# Altium footprint library Package_DFN_QFN.PcbLib: 735 footprints (part 13 of 46)
Each footprint in its own frame and in the unit in brackets; x right, y up, seen from the top. Pads: shape width x height; smd on the part's side, far side on the other; paste and mask are expansions set on the pad; w line width, h text height; cw(c..) or ccw(c..) is an arc to the next point about the centre after c.
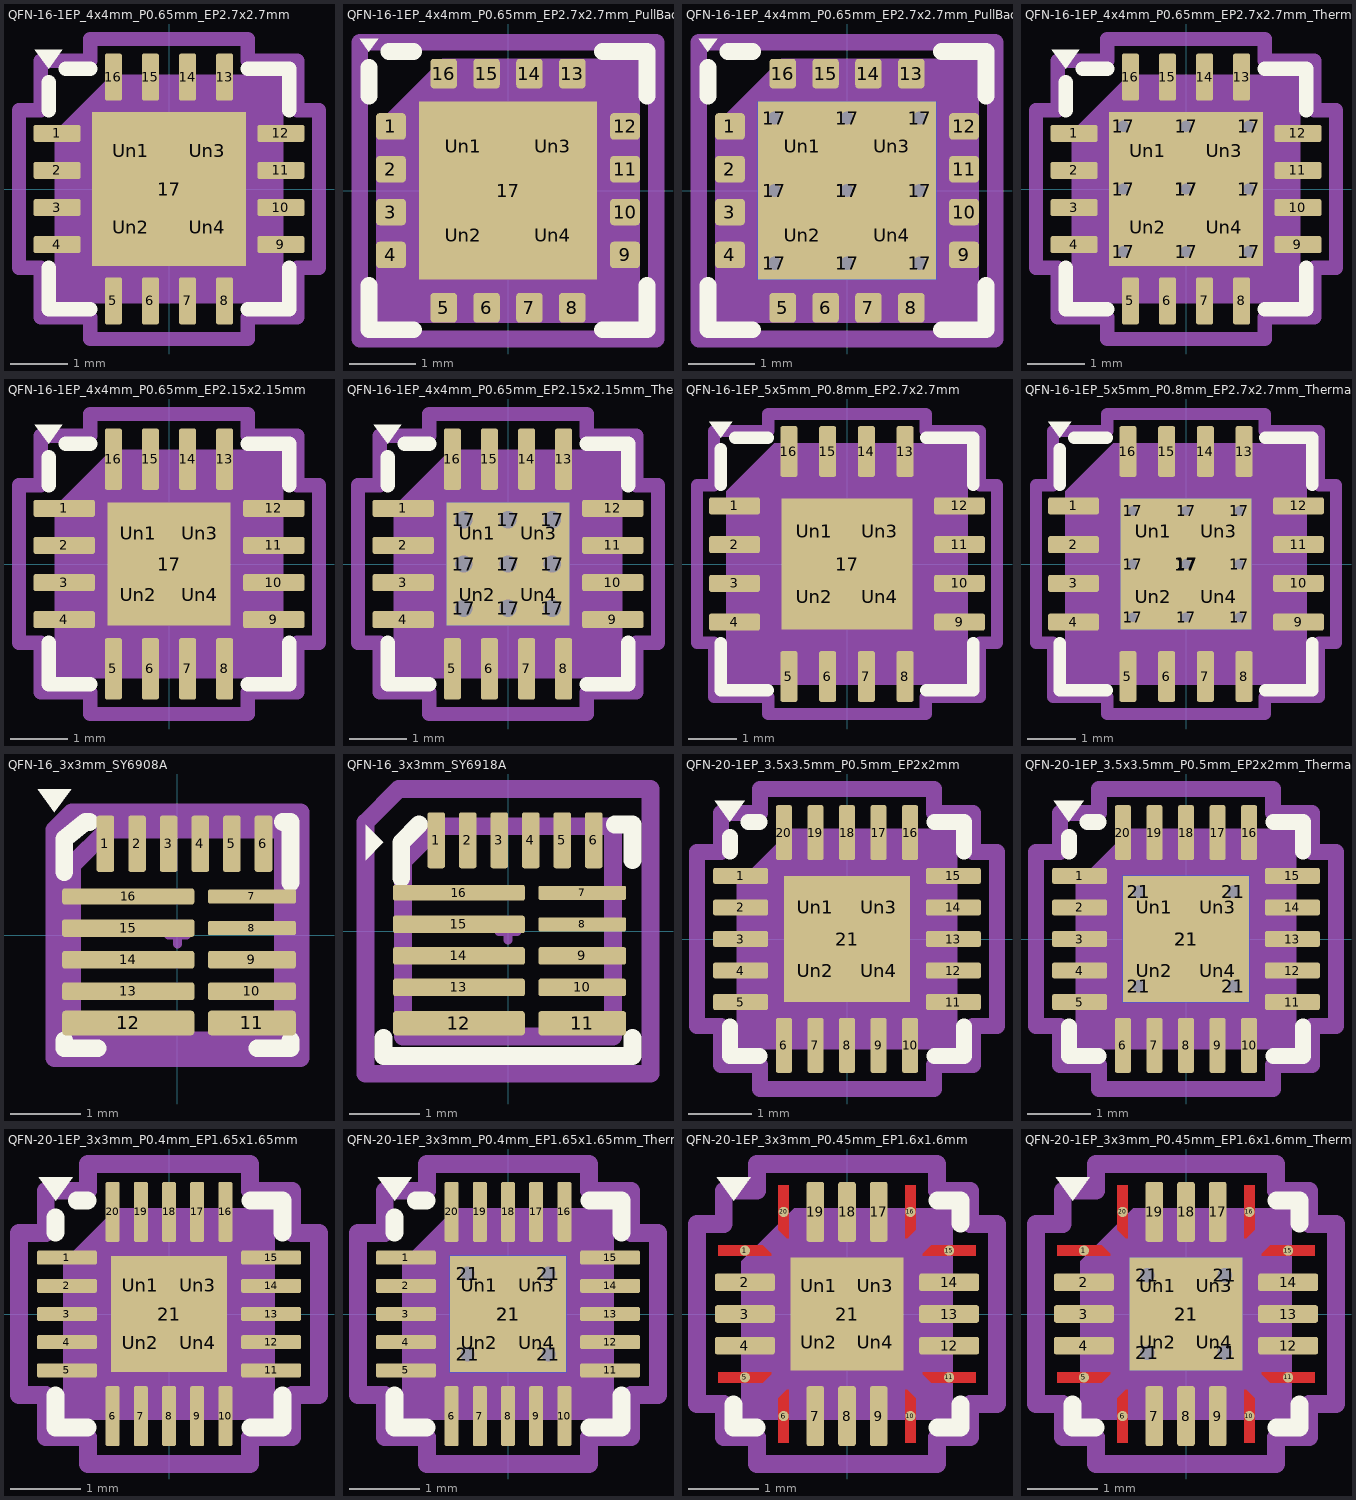
[diagram p12: the footprints below, top view; thin cyan lines are the x and y axes]

## QFN-16-1EP_4x4mm_P0.65mm_EP2.7x2.7mm [mm] "QFN-16-1EP_4x4mm_P0.65mm_EP2.7x2.7mm"
pads (21):
  rrect25% 0.825x0.3 smd: 1(-1.963,0.975) 2(-1.963,0.325) 3(-1.963,-0.325) 4(-1.963,-0.975) 9(1.963,-0.975) 10(1.963,-0.325) 11(1.963,0.325) 12(1.963,0.975)
  rrect25% 0.3x0.825 smd: 5(-0.975,-1.963) 6(-0.325,-1.963) 7(0.325,-1.963) 8(0.975,-1.963) 13(0.975,1.963) 14(0.325,1.963) 15(-0.325,1.963) 16(-0.975,1.963)
  rect 2.7x2.7 smd: 17(0,0)
  rrect23% 1.09x1.09 on Top Paste: Un1(-0.675,0.675) Un2(-0.675,-0.675) Un3(0.675,0.675) Un4(0.675,-0.675)
F.SilkS:
  region: -2.11,2.11 -2.35,2.44 -1.87,2.44
  lines w0.254: -2.11,-1.385 -2.11,-2.11 -1.385,-2.11 ; -2.11,1.385 -2.11,1.87 ; -1.81,2.11 -1.385,2.11 ; 1.385,-2.11 2.11,-2.11 2.11,-1.385 ; 1.385,2.11 2.11,2.11 2.11,1.385
Top Component Center:
  lines w0.127: -0.127,0 0.127,0 -0.127,0 ; 0,-0.127 0,0.127 0,-0.127
Top Assembly:
  region: 2,-2 -2,-2 -2,1 -1,2 2,2
Top Courtyard:
  lines w0.254: -2.63,-1.38 -2.63,1.38 -2.25,1.38 -2.25,2.25 -1.38,2.25 -1.38,2.63 1.38,2.63 1.38,2.25 2.25,2.25 2.25,1.38 2.63,1.38 2.63,-1.38 2.25,-1.38 2.25,-2.25 1.38,-2.25 1.38,-2.63 -1.38,-2.63 -1.38,-2.25 -2.25,-2.25 -2.25,-1.38 -2.63,-1.38
Top Designator:
  text ".Designator" at -3.43,-0.344 h1.52
3D body "QFN-16-1EP_4x4mm_P0.65mm_EP2.5x2.5mm.step": height 0.77, standoff 0, extent -2,-2 2,2

## QFN-16-1EP_4x4mm_P0.65mm_EP2.7x2.7mm_PullBack [mm] "QFN-16-1EP_4x4mm_P0.65mm_EP2.7x2.7mm_PullBack"
pads (21):
  rrect25% 0.45x0.4 smd: 1(-1.775,0.975) 2(-1.775,0.325) 3(-1.775,-0.325) 4(-1.775,-0.975) 9(1.775,-0.975) 10(1.775,-0.325) 11(1.775,0.325) 12(1.775,0.975)
  rrect25% 0.4x0.45 smd: 5(-0.975,-1.775) 6(-0.325,-1.775) 7(0.325,-1.775) 8(0.975,-1.775) 13(0.975,1.775) 14(0.325,1.775) 15(-0.325,1.775) 16(-0.975,1.775)
  rect 2.7x2.7 smd: 17(0,0)
  rrect23% 1.09x1.09 on Top Paste: Un1(-0.675,0.675) Un2(-0.675,-0.675) Un3(0.675,0.675) Un4(0.675,-0.675)
F.SilkS:
  region: -2.11,2.11 -2.25,2.3 -1.97,2.3
  lines w0.254: -2.11,-1.435 -2.11,-2.11 -1.435,-2.11 ; -2.11,1.435 -2.11,1.87 ; -1.81,2.11 -1.435,2.11 ; 1.435,-2.11 2.11,-2.11 2.11,-1.435 ; 1.435,2.11 2.11,2.11 2.11,1.435
Top Component Center:
  lines w0.127: -0.127,0 0.127,0 -0.127,0 ; 0,-0.127 0,0.127 0,-0.127
Top Assembly:
  region: 2,-2 -2,-2 -2,1 -1,2 2,2
Top Courtyard:
  lines w0.254: -2.25,-2.25 2.25,-2.25 2.25,2.25 -2.25,2.25 -2.25,-2.25
Top Designator:
  text ".Designator" at -3.43,-0.344 h1.52
3D body "QFN-16-1EP_4x4mm_P0.65mm_EP2.5x2.5mm.step": height 0.77, standoff 0, extent -2,-2 2,2

## QFN-16-1EP_4x4mm_P0.65mm_EP2.7x2.7mm_PullBack_ThermalVias [mm] "QFN-16-1EP_4x4mm_P0.65mm_EP2.7x2.7mm_PullBack_ThermalVias"
pads (31):
  rrect25% 0.45x0.4 smd: 1(-1.775,0.975) 2(-1.775,0.325) 3(-1.775,-0.325) 4(-1.775,-0.975) 9(1.775,-0.975) 10(1.775,-0.325) 11(1.775,0.325) 12(1.775,0.975)
  rrect25% 0.4x0.45 smd: 5(-0.975,-1.775) 6(-0.325,-1.775) 7(0.325,-1.775) 8(0.975,-1.775) 13(0.975,1.775) 14(0.325,1.775) 15(-0.325,1.775) 16(-0.975,1.775)
  round 0.5 hole 0.2: 17(-1.1,-1.1) 17(-1.1,0) 17(-1.1,1.1) 17(0,-1.1) 17(0,0) 17(0,1.1) 17(1.1,-1.1) 17(1.1,0) 17(1.1,1.1)
  rect 2.7x2.7 smd: 17(0,0)
  rect 2.7x2.7 smd far side: 17(0,0)
  rrect21% 1.17x1.17 on Top Paste: Un1(-0.675,0.675) Un2(-0.675,-0.675) Un3(0.675,0.675) Un4(0.675,-0.675)
F.SilkS:
  region: -2.11,2.11 -2.25,2.3 -1.97,2.3
  lines w0.254: -2.11,-1.435 -2.11,-2.11 -1.435,-2.11 ; -2.11,1.435 -2.11,1.87 ; -1.81,2.11 -1.435,2.11 ; 1.435,-2.11 2.11,-2.11 2.11,-1.435 ; 1.435,2.11 2.11,2.11 2.11,1.435
Top Component Center:
  lines w0.127: -0.127,0 0.127,0 -0.127,0 ; 0,-0.127 0,0.127 0,-0.127
Top Assembly:
  region: 2,-2 -2,-2 -2,1 -1,2 2,2
Top Courtyard:
  lines w0.254: -2.25,-2.25 2.25,-2.25 2.25,2.25 -2.25,2.25 -2.25,-2.25
Top Designator:
  text ".Designator" at -3.43,-0.344 h1.52
3D body "QFN-16-1EP_4x4mm_P0.65mm_EP2.5x2.5mm.step": height 0.77, standoff 0, extent -2,-2 2,2

## QFN-16-1EP_4x4mm_P0.65mm_EP2.7x2.7mm_ThermalVias [mm] "QFN-16-1EP_4x4mm_P0.65mm_EP2.7x2.7mm_ThermalVias"
pads (31):
  rrect25% 0.825x0.3 smd: 1(-1.963,0.975) 2(-1.963,0.325) 3(-1.963,-0.325) 4(-1.963,-0.975) 9(1.963,-0.975) 10(1.963,-0.325) 11(1.963,0.325) 12(1.963,0.975)
  rrect25% 0.3x0.825 smd: 5(-0.975,-1.963) 6(-0.325,-1.963) 7(0.325,-1.963) 8(0.975,-1.963) 13(0.975,1.963) 14(0.325,1.963) 15(-0.325,1.963) 16(-0.975,1.963)
  round 0.5 hole 0.2: 17(-1.1,-1.1) 17(-1.1,0) 17(-1.1,1.1) 17(0,-1.1) 17(0,0) 17(0,1.1) 17(1.1,-1.1) 17(1.1,0) 17(1.1,1.1)
  rect 2.7x2.7 smd: 17(0,0)
  rect 2.7x2.7 smd far side: 17(0,0)
  rrect21% 1.17x1.17 on Top Paste: Un1(-0.675,0.675) Un2(-0.675,-0.675) Un3(0.675,0.675) Un4(0.675,-0.675)
F.SilkS:
  region: -2.11,2.11 -2.35,2.44 -1.87,2.44
  lines w0.254: -2.11,-1.385 -2.11,-2.11 -1.385,-2.11 ; -2.11,1.385 -2.11,1.87 ; -1.81,2.11 -1.385,2.11 ; 1.385,-2.11 2.11,-2.11 2.11,-1.385 ; 1.385,2.11 2.11,2.11 2.11,1.385
Top Component Center:
  lines w0.127: -0.127,0 0.127,0 -0.127,0 ; 0,-0.127 0,0.127 0,-0.127
Top Assembly:
  region: 2,-2 -2,-2 -2,1 -1,2 2,2
Top Courtyard:
  lines w0.254: -2.63,-1.38 -2.25,-1.38 -2.25,-2.25 -1.38,-2.25 -1.38,-2.63 1.38,-2.63 1.38,-2.25 2.25,-2.25 2.25,-1.38 2.63,-1.38 2.63,1.38 2.25,1.38 2.25,2.25 1.38,2.25 1.38,2.63 -1.38,2.63 -1.38,2.25 -2.25,2.25 -2.25,1.38 -2.63,1.38 -2.63,-1.38
Top Designator:
  text ".Designator" at -3.43,-0.344 h1.52
3D body "QFN-16-1EP_4x4mm_P0.65mm_EP2.5x2.5mm.step": height 0.77, standoff 0, extent -2,-2 2,2

## QFN-16-1EP_4x4mm_P0.65mm_EP2.15x2.15mm [mm] "QFN-16-1EP_4x4mm_P0.65mm_EP2.15x2.15mm"
pads (21):
  rrect25% 1.075x0.3 smd: 1(-1.837,0.975) 2(-1.837,0.325) 3(-1.837,-0.325) 4(-1.837,-0.975) 9(1.837,-0.975) 10(1.837,-0.325) 11(1.837,0.325) 12(1.837,0.975)
  rrect25% 0.3x1.075 smd: 5(-0.975,-1.837) 6(-0.325,-1.837) 7(0.325,-1.837) 8(0.975,-1.837) 13(0.975,1.837) 14(0.325,1.837) 15(-0.325,1.837) 16(-0.975,1.837)
  rect 2.15x2.15 smd: 17(0,0)
  rrect25% 0.87x0.87 on Top Paste: Un1(-0.54,0.54) Un2(-0.54,-0.54) Un3(0.54,0.54) Un4(0.54,-0.54)
F.SilkS:
  region: -2.11,2.11 -2.35,2.44 -1.87,2.44
  lines w0.254: -2.11,-1.385 -2.11,-2.11 -1.385,-2.11 ; -2.11,1.385 -2.11,1.87 ; -1.81,2.11 -1.385,2.11 ; 1.385,-2.11 2.11,-2.11 2.11,-1.385 ; 1.385,2.11 2.11,2.11 2.11,1.385
Top Component Center:
  lines w0.127: -0.127,0 0.127,0 -0.127,0 ; 0,-0.127 0,0.127 0,-0.127
Top Assembly:
  region: 2,-2 -2,-2 -2,1 -1,2 2,2
Top Courtyard:
  lines w0.254: -2.63,-1.38 -2.25,-1.38 -2.25,-2.25 -1.38,-2.25 -1.38,-2.63 1.38,-2.63 1.38,-2.25 2.25,-2.25 2.25,-1.38 2.63,-1.38 2.63,1.38 2.25,1.38 2.25,2.25 1.38,2.25 1.38,2.63 -1.38,2.63 -1.38,2.25 -2.25,2.25 -2.25,1.38 -2.63,1.38 -2.63,-1.38
Top Designator:
  text ".Designator" at -3.43,-0.344 h1.52
3D body "QFN-16-1EP_4x4mm_P0.65mm_EP2.15x2.15mm.step": height 0.75, standoff 0, extent -2,-2 2,2

## QFN-16-1EP_4x4mm_P0.65mm_EP2.15x2.15mm_ThermalVias [mm] "QFN-16-1EP_4x4mm_P0.65mm_EP2.15x2.15mm_ThermalVias"
pads (31):
  rrect25% 1.075x0.3 smd: 1(-1.837,0.975) 2(-1.837,0.325) 3(-1.837,-0.325) 4(-1.837,-0.975) 9(1.837,-0.975) 10(1.837,-0.325) 11(1.837,0.325) 12(1.837,0.975)
  rrect25% 0.3x1.075 smd: 5(-0.975,-1.837) 6(-0.325,-1.837) 7(0.325,-1.837) 8(0.975,-1.837) 13(0.975,1.837) 14(0.325,1.837) 15(-0.325,1.837) 16(-0.975,1.837)
  round 0.6 hole 0.3: 17(-0.775,-0.775) 17(-0.775,0) 17(-0.775,0.775) 17(0,-0.775) 17(0,0) 17(0,0.775) 17(0.775,-0.775) 17(0.775,0) 17(0.775,0.775)
  rect 2.15x2.15 smd: 17(0,0)
  rect 2.15x2.15 smd far side: 17(0,0)
  rrect25% 0.93x0.93 on Top Paste: Un1(-0.54,0.54) Un2(-0.54,-0.54) Un3(0.54,0.54) Un4(0.54,-0.54)
F.SilkS:
  region: -2.11,2.11 -2.35,2.44 -1.87,2.44
  lines w0.254: -2.11,-1.385 -2.11,-2.11 -1.385,-2.11 ; -2.11,1.385 -2.11,1.87 ; -1.81,2.11 -1.385,2.11 ; 1.385,-2.11 2.11,-2.11 2.11,-1.385 ; 1.385,2.11 2.11,2.11 2.11,1.385
Top Component Center:
  lines w0.127: -0.127,0 0.127,0 -0.127,0 ; 0,-0.127 0,0.127 0,-0.127
Top Assembly:
  region: 2,-2 -2,-2 -2,1 -1,2 2,2
Top Courtyard:
  lines w0.254: -2.63,-1.38 -2.63,1.38 -2.25,1.38 -2.25,2.25 -1.38,2.25 -1.38,2.63 1.38,2.63 1.38,2.25 2.25,2.25 2.25,1.38 2.63,1.38 2.63,-1.38 2.25,-1.38 2.25,-2.25 1.38,-2.25 1.38,-2.63 -1.38,-2.63 -1.38,-2.25 -2.25,-2.25 -2.25,-1.38 -2.63,-1.38
Top Designator:
  text ".Designator" at -3.43,-0.344 h1.52
3D body "QFN-16-1EP_4x4mm_P0.65mm_EP2.15x2.15mm.step": height 0.75, standoff 0, extent -2,-2 2,2

## QFN-16-1EP_5x5mm_P0.8mm_EP2.7x2.7mm [mm] "QFN-16-1EP_5x5mm_P0.8mm_EP2.7x2.7mm"
pads (21):
  rrect25% 1.05x0.35 smd: 1(-2.325,1.2) 2(-2.325,0.4) 3(-2.325,-0.4) 4(-2.325,-1.2) 9(2.325,-1.2) 10(2.325,-0.4) 11(2.325,0.4) 12(2.325,1.2)
  rrect25% 0.35x1.05 smd: 5(-1.2,-2.325) 6(-0.4,-2.325) 7(0.4,-2.325) 8(1.2,-2.325) 13(1.2,2.325) 14(0.4,2.325) 15(-0.4,2.325) 16(-1.2,2.325)
  rect 2.7x2.7 smd: 17(0,0)
  rrect23% 1.09x1.09 on Top Paste: Un1(-0.675,0.675) Un2(-0.675,-0.675) Un3(0.675,0.675) Un4(0.675,-0.675)
F.SilkS:
  region: -2.61,2.61 -2.85,2.94 -2.37,2.94
  lines w0.254: -2.61,-1.635 -2.61,-2.61 -1.635,-2.61 ; -2.61,1.635 -2.61,2.37 ; -2.31,2.61 -1.635,2.61 ; 1.635,-2.61 2.61,-2.61 2.61,-1.635 ; 1.635,2.61 2.61,2.61 2.61,1.635
Top Component Center:
  lines w0.127: -0.127,0 0.127,0 -0.127,0 ; 0,-0.127 0,0.127 0,-0.127
Top Assembly:
  region: 2.5,-2.5 -2.5,-2.5 -2.5,1.5 -1.5,2.5 2.5,2.5
Top Courtyard:
  lines w0.254: -3.1,-1.63 -2.75,-1.63 -2.75,-2.75 -1.63,-2.75 -1.63,-3.1 1.63,-3.1 1.63,-2.75 2.75,-2.75 2.75,-1.63 3.1,-1.63 3.1,1.63 2.75,1.63 2.75,2.75 1.63,2.75 1.63,3.1 -1.63,3.1 -1.63,2.75 -2.75,2.75 -2.75,1.63 -3.1,1.63 -3.1,-1.63
Top Designator:
  text ".Designator" at -3.43,-0.344 h1.52
3D body "QFN-16-1EP_5x5mm_P0.8mm_EP2.7x2.7mm.step": height 0.92, standoff 0, extent -2.5,-2.5 2.5,2.5

## QFN-16-1EP_5x5mm_P0.8mm_EP2.7x2.7mm_ThermalVias [mm] "QFN-16-1EP_5x5mm_P0.8mm_EP2.7x2.7mm_ThermalVias"
pads (31):
  rrect25% 1.05x0.35 smd: 1(-2.325,1.2) 2(-2.325,0.4) 3(-2.325,-0.4) 4(-2.325,-1.2) 9(2.325,-1.2) 10(2.325,-0.4) 11(2.325,0.4) 12(2.325,1.2)
  rrect25% 0.35x1.05 smd: 5(-1.2,-2.325) 6(-0.4,-2.325) 7(0.4,-2.325) 8(1.2,-2.325) 13(1.2,2.325) 14(0.4,2.325) 15(-0.4,2.325) 16(-1.2,2.325)
  round 0.5 hole 0.2: 17(-1.1,-1.1) 17(-1.1,0) 17(-1.1,1.1) 17(0,-1.1) 17(0,0) 17(0,1.1) 17(1.1,-1.1) 17(1.1,0) 17(1.1,1.1)
  rect 2.7x2.7 smd: 17(0,0)
  rect 2.7x2.7 smd far side: 17(0,0)
  rrect21% 1.17x1.17 on Top Paste: Un1(-0.675,0.675) Un2(-0.675,-0.675) Un3(0.675,0.675) Un4(0.675,-0.675)
F.SilkS:
  region: -2.61,2.61 -2.85,2.94 -2.37,2.94
  lines w0.254: -2.61,-1.635 -2.61,-2.61 -1.635,-2.61 ; -2.61,1.635 -2.61,2.37 ; -2.31,2.61 -1.635,2.61 ; 1.635,-2.61 2.61,-2.61 2.61,-1.635 ; 1.635,2.61 2.61,2.61 2.61,1.635
Top Component Center:
  lines w0.127: -0.127,0 0.127,0 -0.127,0 ; 0,-0.127 0,0.127 0,-0.127
Top Assembly:
  region: 2.5,-2.5 -2.5,-2.5 -2.5,1.5 -1.5,2.5 2.5,2.5
Top Courtyard:
  lines w0.254: -3.1,-1.63 -2.75,-1.63 -2.75,-2.75 -1.63,-2.75 -1.63,-3.1 1.63,-3.1 1.63,-2.75 2.75,-2.75 2.75,-1.63 3.1,-1.63 3.1,1.63 2.75,1.63 2.75,2.75 1.63,2.75 1.63,3.1 -1.63,3.1 -1.63,2.75 -2.75,2.75 -2.75,1.63 -3.1,1.63 -3.1,-1.63
Top Designator:
  text ".Designator" at -3.43,-0.344 h1.52
3D body "QFN-16-1EP_5x5mm_P0.8mm_EP2.7x2.7mm.step": height 0.92, standoff 0, extent -2.5,-2.5 2.5,2.5

## QFN-16_3x3mm_SY6908A [mm]
pads (16):
  rrect25% 0.25x0.8 smd: 1(-1.025,1.3) 2(-0.575,1.3) 3(-0.125,1.3) 4(0.325,1.3) 5(0.775,1.3) 6(1.225,1.3)
  rrect25% 1.25x0.2 smd: 7(1.06,0.55) 8(1.06,0.1)
  rrect25% 1.25x0.25 smd: 9(1.06,-0.35) 10(1.06,-0.8)
  rrect25% 1.25x0.35 smd: 11(1.06,-1.25)
  rrect25% 1.88x0.35 smd: 12(-0.7,-1.25)
  rrect25% 1.88x0.25 smd: 13(-0.7,-0.8) 14(-0.7,-0.35) 15(-0.7,0.1)
  rrect25% 1.88x0.225 smd: 16(-0.7,0.55)
F.SilkS:
  region: -1.75,1.75 -1.99,2.08 -1.51,2.08
  lines w0.254: -1.61,-1.5 -1.61,-1.61 -1.135,-1.61 ; -1.61,0.9 -1.61,1.37 -1.31,1.61 -1.25,1.61 ; 1.135,-1.61 1.61,-1.61 1.61,-1.5 ; 1.5,1.61 1.61,1.61 1.61,0.75
Top Component Center:
  lines w0.127: -0.127,0 0.127,0 ; 0,-0.127 0,0.127
Top Assembly:
  lines w0.254: -1.5,-1.5 -1.5,1 -1,1.5 1.5,1.5 1.5,-1.5 -1.5,-1.5
Top Courtyard:
  lines w0.254: -1.75,-1.75 -1.75,1.5 -1.5,1.75 1.75,1.75 1.75,-1.75 -1.75,-1.75
Top Designator:
  text ".Designator" at -3.54,-0.243 h1.52

## QFN-16_3x3mm_SY6918A [mm]
pads (16):
  rrect25% 0.25x0.8 smd: 1(-1.025,1.3) 2(-0.575,1.3) 3(-0.125,1.3) 4(0.325,1.3) 5(0.775,1.3) 6(1.225,1.3)
  rrect25% 1.25x0.2 smd: 7(1.06,0.55) 8(1.06,0.1)
  rrect25% 1.25x0.25 smd: 9(1.06,-0.35) 10(1.06,-0.8)
  rrect25% 1.25x0.35 smd: 11(1.06,-1.31)
  rrect25% 1.88x0.35 smd: 12(-0.7,-1.31)
  rrect25% 1.88x0.25 smd: 13(-0.7,-0.8) 14(-0.7,-0.35) 15(-0.7,0.1)
  rrect25% 1.88x0.225 smd: 16(-0.7,0.55)
F.SilkS:
  region: -1.778,1.27 -2.032,1.016 -2.032,1.524
  lines w0.254: -1.778,-1.524 -1.778,-1.778 0.508,-1.778 1.778,-1.778 1.778,-1.524 ; -1.524,0.762 -1.524,1.27 -1.27,1.524 ; 1.524,1.524 1.778,1.524 1.778,1.016
Top Component Center:
  lines w0.127: -0.127,0 0.127,0 ; 0,-0.127 0,0.127
Top Assembly:
  lines w0.254: -1.5,-1.5 -1.5,1 -1,1.5 1.5,1.5 1.5,-1.5 -1.5,-1.5
Top Courtyard:
  lines w0.254: -2.032,-2.032 -2.032,1.558 -1.558,2.032 2.032,2.032 2.032,-2.032 -2.032,-2.032
Top Designator:
  text "'.Designator'" at -2.923,-0.268 h0.75
3D body "DFN-14-1EP_3x3mm_P0.4mm_EP1.78x2.35mm.step": height 0.77, standoff 0, extent -1.5,-1.49 1.5,1.49

## QFN-20-1EP_3.5x3.5mm_P0.5mm_EP2x2mm [mm] "QFN-20-1EP_3.5x3.5mm_P0.5mm_EP2x2mm"
pads (25):
  rrect25% 0.875x0.25 smd: 1(-1.687,1) 2(-1.687,0.5) 3(-1.687,0) 4(-1.687,-0.5) 5(-1.687,-1) 11(1.687,-1) 12(1.687,-0.5) 13(1.687,0) 14(1.687,0.5) 15(1.687,1)
  rrect25% 0.25x0.875 smd: 6(-1,-1.687) 7(-0.5,-1.687) 8(0,-1.687) 9(0.5,-1.687) 10(1,-1.687) 16(1,1.687) 17(0.5,1.687) 18(0,1.687) 19(-0.5,1.687) 20(-1,1.687)
  rect 2x2 smd: 21(0,0)
  rrect25% 0.81x0.81 on Top Paste: Un1(-0.5,0.5) Un2(-0.5,-0.5) Un3(0.5,0.5) Un4(0.5,-0.5)
F.SilkS:
  region: -1.86,1.86 -2.1,2.19 -1.62,2.19
  lines w0.254: -1.86,-1.385 -1.86,-1.86 -1.385,-1.86 ; -1.86,1.385 -1.86,1.62 ; -1.56,1.86 -1.385,1.86 ; 1.385,-1.86 1.86,-1.86 1.86,-1.385 ; 1.385,1.86 1.86,1.86 1.86,1.385
Top Component Center:
  lines w0.127: -0.127,0 0.127,0 -0.127,0 ; 0,-0.127 0,0.127 0,-0.127
Top Assembly:
  region: 1.75,-1.75 -1.75,-1.75 -1.75,0.875 -0.875,1.75 1.75,1.75
Top Courtyard:
  lines w0.254: -2.38,-1.38 -2.38,1.38 -2,1.38 -2,2 -1.38,2 -1.38,2.38 1.38,2.38 1.38,2 2,2 2,1.38 2.38,1.38 2.38,-1.38 2,-1.38 2,-2 1.38,-2 1.38,-2.38 -1.38,-2.38 -1.38,-2 -2,-2 -2,-1.38 -2.38,-1.38
Top Designator:
  text ".Designator" at -3.43,-0.344 h1.52

## QFN-20-1EP_3.5x3.5mm_P0.5mm_EP2x2mm_ThermalVias [mm] "QFN-20-1EP_3.5x3.5mm_P0.5mm_EP2x2mm_ThermalVias"
pads (30):
  rrect25% 0.875x0.25 smd: 1(-1.687,1) 2(-1.687,0.5) 3(-1.687,0) 4(-1.687,-0.5) 5(-1.687,-1) 11(1.687,-1) 12(1.687,-0.5) 13(1.687,0) 14(1.687,0.5) 15(1.687,1)
  rrect25% 0.25x0.875 smd: 6(-1,-1.687) 7(-0.5,-1.687) 8(0,-1.687) 9(0.5,-1.687) 10(1,-1.687) 16(1,1.687) 17(0.5,1.687) 18(0,1.687) 19(-0.5,1.687) 20(-1,1.687)
  round 0.5 hole 0.2: 21(-0.75,-0.75) 21(-0.75,0.75) 21(0.75,-0.75) 21(0.75,0.75)
  rect 2x2 smd: 21(0,0)
  rect 2x2 smd far side: 21(0,0)
  rrect25% 0.87x0.87 on Top Paste: Un1(-0.5,0.5) Un2(-0.5,-0.5) Un3(0.5,0.5) Un4(0.5,-0.5)
F.SilkS:
  region: -1.86,1.86 -2.1,2.19 -1.62,2.19
  lines w0.254: -1.86,-1.385 -1.86,-1.86 -1.385,-1.86 ; -1.86,1.385 -1.86,1.62 ; -1.56,1.86 -1.385,1.86 ; 1.385,-1.86 1.86,-1.86 1.86,-1.385 ; 1.385,1.86 1.86,1.86 1.86,1.385
Top Component Center:
  lines w0.127: -0.127,0 0.127,0 -0.127,0 ; 0,-0.127 0,0.127 0,-0.127
Top Assembly:
  region: 1.75,-1.75 -1.75,-1.75 -1.75,0.875 -0.875,1.75 1.75,1.75
Top Courtyard:
  lines w0.254: -2.38,-1.38 -2.38,1.38 -2,1.38 -2,2 -1.38,2 -1.38,2.38 1.38,2.38 1.38,2 2,2 2,1.38 2.38,1.38 2.38,-1.38 2,-1.38 2,-2 1.38,-2 1.38,-2.38 -1.38,-2.38 -1.38,-2 -2,-2 -2,-1.38 -2.38,-1.38
Top Designator:
  text ".Designator" at -3.43,-0.344 h1.52

## QFN-20-1EP_3x3mm_P0.4mm_EP1.65x1.65mm [mm] "QFN-20-1EP_3x3mm_P0.4mm_EP1.65x1.65mm"
pads (25):
  rrect25% 0.85x0.2 smd: 1(-1.45,0.8) 2(-1.45,0.4) 3(-1.45,0) 4(-1.45,-0.4) 5(-1.45,-0.8) 11(1.45,-0.8) 12(1.45,-0.4) 13(1.45,0) 14(1.45,0.4) 15(1.45,0.8)
  rrect25% 0.2x0.85 smd: 6(-0.8,-1.45) 7(-0.4,-1.45) 8(0,-1.45) 9(0.4,-1.45) 10(0.8,-1.45) 16(0.8,1.45) 17(0.4,1.45) 18(0,1.45) 19(-0.4,1.45) 20(-0.8,1.45)
  rect 1.65x1.65 smd: 21(0,0)
  rrect25% 0.67x0.67 on Top Paste: Un1(-0.41,0.41) Un2(-0.41,-0.41) Un3(0.41,0.41) Un4(0.41,-0.41)
F.SilkS:
  region: -1.61,1.61 -1.85,1.94 -1.37,1.94
  lines w0.254: -1.61,-1.16 -1.61,-1.61 -1.16,-1.61 ; -1.61,1.16 -1.61,1.37 ; -1.31,1.61 -1.16,1.61 ; 1.16,-1.61 1.61,-1.61 1.61,-1.16 ; 1.16,1.61 1.61,1.61 1.61,1.16
Top Component Center:
  lines w0.127: -0.127,0 0.127,0 -0.127,0 ; 0,-0.127 0,0.127 0,-0.127
Top Assembly:
  region: 1.5,-1.5 -1.5,-1.5 -1.5,0.75 -0.75,1.5 1.5,1.5
Top Courtyard:
  lines w0.254: -2.13,-1.15 -1.75,-1.15 -1.75,-1.75 -1.15,-1.75 -1.15,-2.13 1.15,-2.13 1.15,-1.75 1.75,-1.75 1.75,-1.15 2.13,-1.15 2.13,1.15 1.75,1.15 1.75,1.75 1.15,1.75 1.15,2.13 -1.15,2.13 -1.15,1.75 -1.75,1.75 -1.75,1.15 -2.13,1.15 -2.13,-1.15
Top Designator:
  text ".Designator" at -3.43,-0.344 h1.52

## QFN-20-1EP_3x3mm_P0.4mm_EP1.65x1.65mm_ThermalVias [mm] "QFN-20-1EP_3x3mm_P0.4mm_EP1.65x1.65mm_ThermalVias"
pads (30):
  rrect25% 0.85x0.2 smd: 1(-1.45,0.8) 2(-1.45,0.4) 3(-1.45,0) 4(-1.45,-0.4) 5(-1.45,-0.8) 11(1.45,-0.8) 12(1.45,-0.4) 13(1.45,0) 14(1.45,0.4) 15(1.45,0.8)
  rrect25% 0.2x0.85 smd: 6(-0.8,-1.45) 7(-0.4,-1.45) 8(0,-1.45) 9(0.4,-1.45) 10(0.8,-1.45) 16(0.8,1.45) 17(0.4,1.45) 18(0,1.45) 19(-0.4,1.45) 20(-0.8,1.45)
  round 0.5 hole 0.2: 21(-0.575,-0.575) 21(-0.575,0.575) 21(0.575,-0.575) 21(0.575,0.575)
  rect 1.65x1.65 smd: 21(0,0)
  rect 1.65x1.65 smd far side: 21(0,0)
  rrect25% 0.69x0.69 on Top Paste: Un1(-0.41,0.41) Un2(-0.41,-0.41) Un3(0.41,0.41) Un4(0.41,-0.41)
F.SilkS:
  region: -1.61,1.61 -1.85,1.94 -1.37,1.94
  lines w0.254: -1.61,-1.16 -1.61,-1.61 -1.16,-1.61 ; -1.61,1.16 -1.61,1.37 ; -1.31,1.61 -1.16,1.61 ; 1.16,-1.61 1.61,-1.61 1.61,-1.16 ; 1.16,1.61 1.61,1.61 1.61,1.16
Top Component Center:
  lines w0.127: -0.127,0 0.127,0 -0.127,0 ; 0,-0.127 0,0.127 0,-0.127
Top Assembly:
  region: 1.5,-1.5 -1.5,-1.5 -1.5,0.75 -0.75,1.5 1.5,1.5
Top Courtyard:
  lines w0.254: -2.13,-1.15 -2.13,1.15 -1.75,1.15 -1.75,1.75 -1.15,1.75 -1.15,2.13 1.15,2.13 1.15,1.75 1.75,1.75 1.75,1.15 2.13,1.15 2.13,-1.15 1.75,-1.15 1.75,-1.75 1.15,-1.75 1.15,-2.13 -1.15,-2.13 -1.15,-1.75 -1.75,-1.75 -1.75,-1.15 -2.13,-1.15
Top Designator:
  text ".Designator" at -3.43,-0.344 h1.52

## QFN-20-1EP_3x3mm_P0.45mm_EP1.6x1.6mm [mm] "QFN-20-1EP_3x3mm_P0.45mm_EP1.6x1.6mm"
pads (25):
  round 0.144 smd: 1(-1.45,0.9) 5(-1.45,-0.9) 6(-0.9,-1.45) 10(0.9,-1.45) 11(1.45,-0.9) 15(1.45,0.9) 16(0.9,1.45) 20(-0.9,1.45)
  rrect25% 0.85x0.25 smd: 2(-1.45,0.45) 3(-1.45,0) 4(-1.45,-0.45) 12(1.45,-0.45) 13(1.45,0) 14(1.45,0.45)
  rrect25% 0.25x0.85 smd: 7(-0.45,-1.45) 8(0,-1.45) 9(0.45,-1.45) 17(0.45,1.45) 18(0,1.45) 19(-0.45,1.45)
  rect 1.6x1.6 smd: 21(0,0)
  rrect25% 0.64x0.64 on Top Paste: Un1(-0.4,0.4) Un2(-0.4,-0.4) Un3(0.4,0.4) Un4(0.4,-0.4)
F.Cu:
  region: -0.825,1.075 -0.854,1.075 -0.975,1.196 -0.975,1.825 -0.825,1.825
  region: 0.975,1.196 0.854,1.075 0.825,1.075 0.825,1.825 0.975,1.825
  region: 1.825,0.825 1.075,0.825 1.075,0.854 1.196,0.975 1.825,0.975
  region: 1.825,-0.975 1.196,-0.975 1.075,-0.854 1.075,-0.825 1.825,-0.825
  region: 0.975,-1.196 0.975,-1.825 0.825,-1.825 0.825,-1.075 0.854,-1.075
  region: -0.825,-1.825 -0.975,-1.825 -0.975,-1.196 -0.854,-1.075 -0.825,-1.075
  region: -1.075,-0.854 -1.196,-0.975 -1.825,-0.975 -1.825,-0.825 -1.075,-0.825
  region: -1.075,0.854 -1.075,0.825 -1.825,0.825 -1.825,0.975 -1.196,0.975
F.SilkS:
  region: -1.61,1.61 -1.85,1.94 -1.37,1.94
  lines w0.254: -1.61,-1.285 -1.61,-1.61 -1.285,-1.61 ; 1.285,-1.61 1.61,-1.61 1.61,-1.285 ; 1.285,1.61 1.61,1.61 1.61,1.285
F.Paste:
  region: -0.825,1.075 -0.854,1.075 -0.975,1.196 -0.975,1.825 -0.825,1.825
  region: 0.975,1.196 0.854,1.075 0.825,1.075 0.825,1.825 0.975,1.825
  region: 1.825,0.825 1.075,0.825 1.075,0.854 1.196,0.975 1.825,0.975
  region: 1.825,-0.975 1.196,-0.975 1.075,-0.854 1.075,-0.825 1.825,-0.825
  region: 0.975,-1.196 0.975,-1.825 0.825,-1.825 0.825,-1.075 0.854,-1.075
  region: -0.825,-1.825 -0.975,-1.825 -0.975,-1.196 -0.854,-1.075 -0.825,-1.075
  region: -1.075,-0.854 -1.196,-0.975 -1.825,-0.975 -1.825,-0.825 -1.075,-0.825
  region: -1.075,0.854 -1.075,0.825 -1.825,0.825 -1.825,0.975 -1.196,0.975
F.Mask:
  region: -0.825,1.075 -0.854,1.075 -0.975,1.196 -0.975,1.825 -0.825,1.825
  region: 0.975,1.196 0.854,1.075 0.825,1.075 0.825,1.825 0.975,1.825
  region: 1.825,0.825 1.075,0.825 1.075,0.854 1.196,0.975 1.825,0.975
  region: 1.825,-0.975 1.196,-0.975 1.075,-0.854 1.075,-0.825 1.825,-0.825
  region: 0.975,-1.196 0.975,-1.825 0.825,-1.825 0.825,-1.075 0.854,-1.075
  region: -0.825,-1.825 -0.975,-1.825 -0.975,-1.196 -0.854,-1.075 -0.825,-1.075
  region: -1.075,-0.854 -1.196,-0.975 -1.825,-0.975 -1.825,-0.825 -1.075,-0.825
  region: -1.075,0.854 -1.075,0.825 -1.825,0.825 -1.825,0.975 -1.196,0.975
Top Component Center:
  lines w0.127: -0.127,0 0.127,0 -0.127,0 ; 0,-0.127 0,0.127 0,-0.127
Top Assembly:
  region: 1.5,-1.5 -1.5,-1.5 -1.5,0.75 -0.75,1.5 1.5,1.5
Top Courtyard:
  lines w0.254: -2.13,-1.28 -1.75,-1.28 -1.75,-1.75 -1.28,-1.75 -1.28,-2.13 1.28,-2.13 1.28,-1.75 1.75,-1.75 1.75,-1.28 2.13,-1.28 2.13,1.28 1.75,1.28 1.75,1.75 1.28,1.75 1.28,2.13 -1.28,2.13 -1.28,1.75 -1.75,1.75 -1.75,1.28 -2.13,1.28 -2.13,-1.28
Top Designator:
  text ".Designator" at -3.43,-0.344 h1.52

## QFN-20-1EP_3x3mm_P0.45mm_EP1.6x1.6mm_ThermalVias [mm] "QFN-20-1EP_3x3mm_P0.45mm_EP1.6x1.6mm_ThermalVias"
pads (30):
  round 0.144 smd: 1(-1.45,0.9) 5(-1.45,-0.9) 6(-0.9,-1.45) 10(0.9,-1.45) 11(1.45,-0.9) 15(1.45,0.9) 16(0.9,1.45) 20(-0.9,1.45)
  rrect25% 0.85x0.25 smd: 2(-1.45,0.45) 3(-1.45,0) 4(-1.45,-0.45) 12(1.45,-0.45) 13(1.45,0) 14(1.45,0.45)
  rrect25% 0.25x0.85 smd: 7(-0.45,-1.45) 8(0,-1.45) 9(0.45,-1.45) 17(0.45,1.45) 18(0,1.45) 19(-0.45,1.45)
  round 0.5 hole 0.2: 21(-0.55,-0.55) 21(-0.55,0.55) 21(0.55,-0.55) 21(0.55,0.55)
  rect 1.6x1.6 smd: 21(0,0)
  rect 1.6x1.6 smd far side: 21(0,0)
  rrect25% 0.69x0.69 on Top Paste: Un1(-0.4,0.4) Un2(-0.4,-0.4) Un3(0.4,0.4) Un4(0.4,-0.4)
F.Cu:
  region: -0.825,1.075 -0.854,1.075 -0.975,1.196 -0.975,1.825 -0.825,1.825
  region: 0.975,1.196 0.854,1.075 0.825,1.075 0.825,1.825 0.975,1.825
  region: 1.825,0.825 1.075,0.825 1.075,0.854 1.196,0.975 1.825,0.975
  region: 1.825,-0.975 1.196,-0.975 1.075,-0.854 1.075,-0.825 1.825,-0.825
  region: 0.975,-1.196 0.975,-1.825 0.825,-1.825 0.825,-1.075 0.854,-1.075
  region: -0.825,-1.825 -0.975,-1.825 -0.975,-1.196 -0.854,-1.075 -0.825,-1.075
  region: -1.075,-0.854 -1.196,-0.975 -1.825,-0.975 -1.825,-0.825 -1.075,-0.825
  region: -1.075,0.854 -1.075,0.825 -1.825,0.825 -1.825,0.975 -1.196,0.975
F.SilkS:
  region: -1.61,1.61 -1.85,1.94 -1.37,1.94
  lines w0.254: -1.61,-1.285 -1.61,-1.61 -1.285,-1.61 ; 1.285,-1.61 1.61,-1.61 1.61,-1.285 ; 1.285,1.61 1.61,1.61 1.61,1.285
F.Paste:
  region: -0.825,1.075 -0.854,1.075 -0.975,1.196 -0.975,1.825 -0.825,1.825
  region: 0.975,1.196 0.854,1.075 0.825,1.075 0.825,1.825 0.975,1.825
  region: 1.825,0.825 1.075,0.825 1.075,0.854 1.196,0.975 1.825,0.975
  region: 1.825,-0.975 1.196,-0.975 1.075,-0.854 1.075,-0.825 1.825,-0.825
  region: 0.975,-1.196 0.975,-1.825 0.825,-1.825 0.825,-1.075 0.854,-1.075
  region: -0.825,-1.825 -0.975,-1.825 -0.975,-1.196 -0.854,-1.075 -0.825,-1.075
  region: -1.075,-0.854 -1.196,-0.975 -1.825,-0.975 -1.825,-0.825 -1.075,-0.825
  region: -1.075,0.854 -1.075,0.825 -1.825,0.825 -1.825,0.975 -1.196,0.975
F.Mask:
  region: -0.825,1.075 -0.854,1.075 -0.975,1.196 -0.975,1.825 -0.825,1.825
  region: 0.975,1.196 0.854,1.075 0.825,1.075 0.825,1.825 0.975,1.825
  region: 1.825,0.825 1.075,0.825 1.075,0.854 1.196,0.975 1.825,0.975
  region: 1.825,-0.975 1.196,-0.975 1.075,-0.854 1.075,-0.825 1.825,-0.825
  region: 0.975,-1.196 0.975,-1.825 0.825,-1.825 0.825,-1.075 0.854,-1.075
  region: -0.825,-1.825 -0.975,-1.825 -0.975,-1.196 -0.854,-1.075 -0.825,-1.075
  region: -1.075,-0.854 -1.196,-0.975 -1.825,-0.975 -1.825,-0.825 -1.075,-0.825
  region: -1.075,0.854 -1.075,0.825 -1.825,0.825 -1.825,0.975 -1.196,0.975
Top Component Center:
  lines w0.127: -0.127,0 0.127,0 -0.127,0 ; 0,-0.127 0,0.127 0,-0.127
Top Assembly:
  region: 1.5,-1.5 -1.5,-1.5 -1.5,0.75 -0.75,1.5 1.5,1.5
Top Courtyard:
  lines w0.254: -2.13,-1.28 -1.75,-1.28 -1.75,-1.75 -1.28,-1.75 -1.28,-2.13 1.28,-2.13 1.28,-1.75 1.75,-1.75 1.75,-1.28 2.13,-1.28 2.13,1.28 1.75,1.28 1.75,1.75 1.28,1.75 1.28,2.13 -1.28,2.13 -1.28,1.75 -1.75,1.75 -1.75,1.28 -2.13,1.28 -2.13,-1.28
Top Designator:
  text ".Designator" at -3.43,-0.344 h1.52